# EAGLE library part CH340G (library CH340G)
USB serial converter, UART, SOIC-16
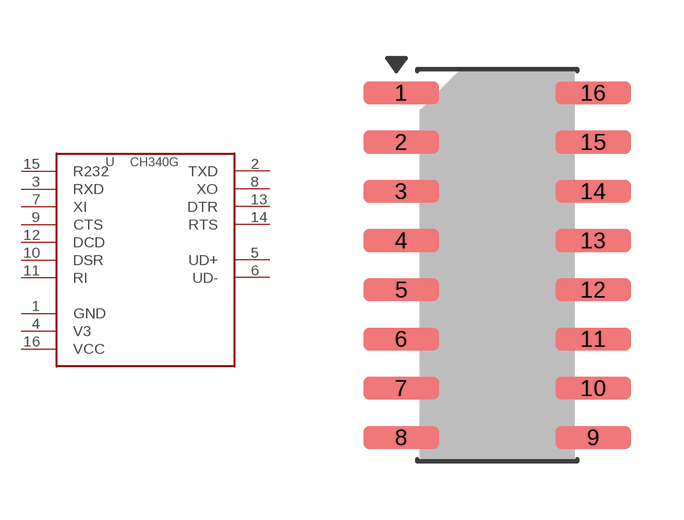
[diagram p0: symbol with the pads of SOIC-16_3.9x9.9mm_P1.27mm; footprint SOIC-16_3.9x9.9mm_P1.27mm]

Designator prefix U

## CH340G  [SOIC-16_3.9x9.9mm_P1.27mm]
1  GND  pwr
2  TXD  out
3  RXD  in
4  V3  out
5  UD+
6  UD-
7  XI  in
8  XO  out
9  CTS  in
10  DSR  in
11  RI  in
12  DCD  in
13  DTR  out
14  RTS  out
15  R232  in
16  VCC  pwr

## Footprint SOIC-16_3.9x9.9mm_P1.27mm (pad centres in mm)
SOIC-16, 3.9 x 9.9 mm, 1.27 mm pitch
smd 1.95 x 0.6: 1 -2.475,4.445; 2 -2.475,3.175; 3 -2.475,1.905; 4 -2.475,0.635; 5 -2.475,-0.635; 6 -2.475,-1.905; 7 -2.475,-3.175; 8 -2.475,-4.445; 9 2.475,-4.445; 10 2.475,-3.175; 11 2.475,-1.905; 12 2.475,-0.635; 13 2.475,0.635; 14 2.475,1.905; 15 2.475,3.175; 16 2.475,4.445